# Altium footprint library LimeMicroAltiumLib.PcbLib: 876 footprints (part 38 of 57)
Each footprint in its own frame and in the unit in brackets; x right, y up, seen from the top. Pads: shape width x height; smd on the part's side, far side on the other; paste and mask are expansions set on the pad; w line width, h text height; cw(c..) or ccw(c..) is an arc to the next point about the centre after c.
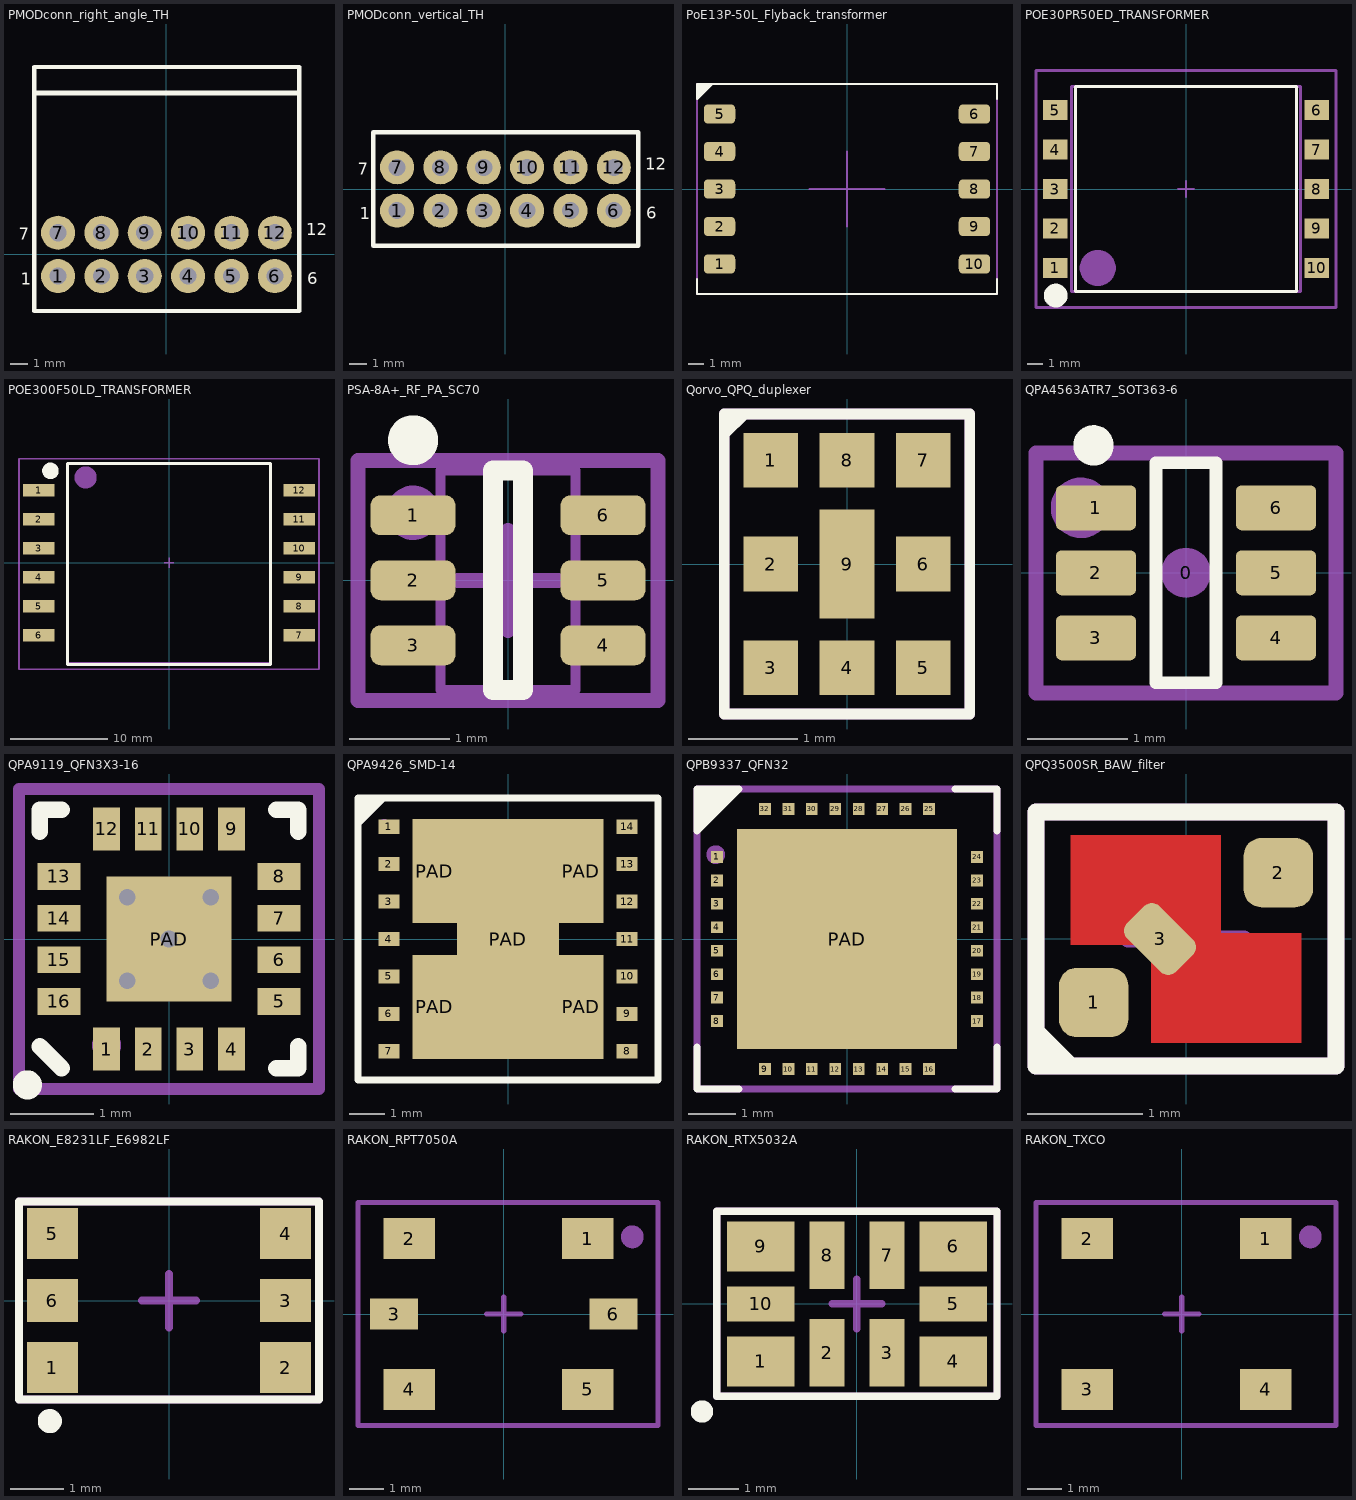
[diagram p37: the footprints below, top view; thin cyan lines are the x and y axes]

## PMODconn_right_angle_TH [mm] "JTAG"
pads (12):
  round 2 hole 1: 1(-6.357,-1.271) 2(-3.814,-1.271) 3(-1.271,-1.271) 4(1.271,-1.271) 5(3.814,-1.271) 6(6.357,-1.271) 7(-6.357,1.271) 8(-3.814,1.271) 9(-1.271,1.271) 10(1.271,1.271) 11(3.814,1.271) 12(6.357,1.271)
Top Overlay:
  lines w0.254: -7.757,-3.321 -7.757,11 7.786,11 7.786,-3.321 -7.757,-3.321
  lines w0.3: -7.7,9.475 7.75,9.475
  text "1" at -8.55,-1.775 h0.7
  text "6" at 8.25,-1.75 h0.7
  text "12" at 8.2,1.125 h0.7
  text "7" at -8.65,0.85 h0.7
Mechanical 15:
  lines w0.15: -7.757,-3.321 7.786,-3.321 7.786,11 -7.757,11 -7.757,-3.321
  text "PCB edge" at -2.225,9.65 h0.55
  text ".Designator" at 0.1,0.025 h0.55
  text "1" at -6.5,-1.75 h0.7
  text "12" at 6.025,0.9 h0.7
3D body "BG151-10-X-0320-X-X_revF.step": height 5, standoff -3.2, extent -5.382,-1.39 7.818,11.45
3D body "BG151-10-X-0320-X-X_revF.step": height 5, standoff -3.2, extent -7.925,-1.39 5.275,11.45

## PMODconn_vertical_TH [mm] "JTAG"
pads (12):
  round 2 hole 1: 1(-6.357,-1.271) 2(-3.814,-1.271) 3(-1.271,-1.271) 4(1.271,-1.271) 5(3.814,-1.271) 6(6.357,-1.271) 7(-6.357,1.271) 8(-3.814,1.271) 9(-1.271,1.271) 10(1.271,1.271) 11(3.814,1.271) 12(6.357,1.271)
Top Overlay:
  lines w0.254: -7.757,-3.321 -7.757,3.321 7.786,3.321 7.786,-3.321 -7.757,-3.321
  text "1" at -8.55,-1.775 h0.7
  text "6" at 8.25,-1.75 h0.7
  text "12" at 8.2,1.125 h0.7
  text "7" at -8.65,0.85 h0.7
Mechanical 15:
  lines w0.15: -7.757,-3.321 7.786,-3.321 7.786,3.321 -7.757,3.321 -7.757,-3.321
  text ".Designator" at 0.1,0.025 h0.55
  text "1" at -6.5,-1.75 h0.7
  text "12" at 6.025,0.9 h0.7

## PoE13P-50L_Flyback_transformer [mm]
pads (10):
  rrect50% 2.1x1.3 smd: 1(-8.5,-5) 2(-8.5,-2.5) 3(-8.5,0) 4(-8.5,2.5) 5(-8.5,5) 6(8.5,5) 7(8.5,2.5) 8(8.5,0) 9(8.5,-2.5) 10(8.5,-5)
Top Overlay:
  region: -10,6 -9,7 -10,7
  lines w0.15: -10,-6 -10,-7 10,-7 10,-6 ; -9,7 -10,6 -10,7 10,7 10,6
Mechanical 15:
  lines w0.15: -2.5,0 2.5,0 ; 0,-2.5 0,2.5 ; -10,-7 10,-7 10,7 -10,7 -10,-7
  text "10" at 8.5,-5.5 h0.55
  text "5" at -9,4.5 h0.55
  text "6" at 8.5,4.5 h0.55
  text "1" at -9,-5.5 h0.55
  text ".Designator" at 0,0 h0.55
3D body "Coilcraft-POE13P-50L.step": height 12.7, standoff 0, extent -8.875,-6.73 8.875,6.73

## POE30PR50ED_TRANSFORMER [mm]
pads (10):
  rect 1.55x1.27 smd: 1(-8.27,-5) 2(-8.27,-2.5) 3(-8.27,0) 4(-8.27,2.5) 5(-8.27,5) 6(8.27,5) 7(8.27,2.5) 8(8.27,0) 9(8.27,-2.5) 10(8.27,-5)
Top Overlay:
  circle w1: c-8.25,-6.75 r0.25
  lines w0.2: -7,-6.5 7,-6.5 7,6.5 -7,6.5 -7,-6.5
Mechanical 13:
  lines w0.2: -7.25,-6.5 7.25,-6.5 7.25,6.5 -7.25,6.5 -7.25,-6.5
Mechanical 15:
  lines w0.15: -0.5,0 0.5,0 ; 0,-0.5 0,0.5
  lines w0.2: -9.5,-7.5 9.5,-7.5 9.5,7.5 -9.5,7.5 -9.5,-7.5
  lines w1.27: -5.588,-5.508 ccw(c-5.588,-5) -5.588,-4.492 ccw(c-5.588,-5) -5.588,-5.508
  text ".Designator" at 0,0 h0.55
3D body "Coilcraft-POEXXPR.step": height 13.93, standoff 0.06, extent -8.5,-7.25 8.5,7.25

## POE300F50LD_TRANSFORMER [mm]
pads (12):
  rect 3.3x1.27 smd: 1(-13.46,7.5) 2(-13.46,4.5) 3(-13.46,1.5) 4(-13.46,-1.5) 5(-13.46,-4.5) 6(-13.46,-7.5) 7(13.46,-7.5) 8(13.46,-4.5) 9(13.46,-1.5) 10(13.46,1.5) 11(13.46,4.5) 12(13.46,7.5)
Top Overlay:
  circle w1: c-12.25,9.5 r0.354
  lines w0.3: -10.5,-10.5 -10.5,10.25 10.5,10.25 10.5,-10.5 -10.5,-10.5
Mechanical 13:
  lines w0.1: -10.5,-10.285 -10.5,10.285 10.5,10.285 10.5,-10.285 -10.5,-10.285
Mechanical 15:
  lines w0.15: -0.5,0 0.5,0 ; 0,-0.5 0,0.5
  lines w0.2: -15.5,-11 -15.5,10.75 15.5,10.75 15.5,-11 -15.5,-11
  lines w1.27: -8.615,8.312 ccw(c-8.615,8.82) -8.615,9.328 ccw(c-8.615,8.82) -8.615,8.312
  text ".Designator" at 0,0 h0.55
3D body "Coilcraft-POE300F-XXX.step": height 11.44, standoff 0.01, extent -14.198,-10.412 14.452,10.158

## PSA-8A+_RF_PA_SC70 [mm] "SOT23, 6-Leads, Body 2x1.3mm, Pitch 0.65mm, Lead Span 2.1mm, IPC Medium Density"
height 1.1
pads (6):
  rrect50% 0.85x0.4 smd mask+0.05: 1(-0.95,0.65) 2(-0.95,0) 3(-0.95,-0.65) 4(0.95,-0.65) 5(0.95,0) 6(0.95,0.65)
Top Overlay:
  circle w0.25: c-0.95,1.4 r0.125
  lines w0.2: -0.15,-1.1 -0.15,1.1 0.15,1.1 0.15,-1.1 -0.15,-1.1
Mechanical 13:
  lines w0.1: -0.675,-1.1 0.675,-1.1 0.675,1.1 -0.675,1.1 -0.675,-1.1
Mechanical 15:
  circle w0.4: c-0.95,0.675 r0.071
  lines w0.15: -0.5,0 0.5,0 ; 0,-0.5 0,0.5 ; -1.5,-1.2 1.5,-1.2 1.5,1.2 -1.5,1.2 -1.5,-1.2
  text ".Designator" at 0,0 h0.55
3D body "User Library-SC70-6.step": height 0.43, standoff -0.53, extent -1.05,-1 1.05,1

## Qorvo_QPQ_duplexer [mm] "QPQ1270, QPQ1282, QPQ1297 BAW duplexers"
pads (9):
  rect 0.5x0.5 smd mask+0.05: 1(-0.7,0.95) 2(-0.7,0) 3(-0.7,-0.95) 4(0,-0.95) 5(0.7,-0.95) 6(0.7,0) 7(0.7,0.95) 8(0,0.95)
  rect 0.5x1 smd mask+0.05: 9(0,0)
Top Overlay:
  region: -1.125,1.375 -1.125,1.125 -0.875,1.375
  lines w0.1: -1.125,-1.375 1.125,-1.375 1.125,1.375 -1.125,1.375 -1.125,-1.375
Mechanical 13:
  region: -0.9,0.75 -0.9,1.15 -0.5,1.15 -0.5,0.75
  region: -0.9,-0.2 -0.9,0.2 -0.5,0.2 -0.5,-0.2
  region: -0.9,-1.15 -0.9,-0.75 -0.5,-0.75 -0.5,-1.15
  region: -0.2,-1.15 -0.2,-0.75 0.2,-0.75 0.2,-1.15
  region: 0.5,-1.15 0.5,-0.75 0.9,-0.75 0.9,-1.15
  region: 0.5,-0.2 0.5,0.2 0.9,0.2 0.9,-0.2
  region: 0.5,0.75 0.5,1.15 0.9,1.15 0.9,0.75
  region: -0.2,0.75 -0.2,1.15 0.2,1.15 0.2,0.75
  region: -0.2,-0.45 -0.2,0.45 0.2,0.45 0.2,-0.45
Mechanical 15:
  circle w0.2: c-0.7,0.975 r0.035
  lines w0.1: -0.175,0 0.175,0 ; 0,-0.175 0,0.175 ; -1.125,-1.375 -1.125,1.375 1.125,1.375 1.125,-1.375 -1.125,-1.375
  text ".Designator" at 0,0 h0.55
3D body: height 1.15, standoff 0, extent -1,-1.25 1,1.25
3D body: height 1.18, standoff 0, extent -0.898,0.751 -0.5,1.15

## QPA4563ATR7_SOT363-6 [mm]
height 1.6
pads (7):
  round 0.5 on Mech15: 0(0,0)
  rrect25% 0.8x0.45 smd: 1(-0.9,0.65) 2(-0.9,0) 3(-0.9,-0.65) 4(0.9,-0.65) 5(0.9,0) 6(0.9,0.65)
Top Overlay:
  circle w0.2: c-0.925,1.275 r0.102
  lines w0.127: -0.3,-1.1 -0.3,1.1 0.3,1.1 0.3,-1.1 -0.3,-1.1
Top Solder:
  region: -1.3,-0.975
  region: -1.4,-0.975 -0.4,-0.975 -0.4,0.975 -1.4,0.975
  region: 1.4,-0.975 0.4,-0.975 0.4,0.975 1.4,0.975
Mechanical 15:
  circle w0.35: c-1.05,0.65 r0.127
  lines w0.15: -1.5,-1.2 -1.5,1.2 1.5,1.2 1.5,-1.2 -1.5,-1.2
  text ".Designator" at 0,0 h0.55
3D body "User Library-SC70-6.step": height 0.92, standoff -0.03, extent -1.05,-1 1.05,1

## QPA9119_QFN3X3-16 [mm] "Quad Flat No Lead, Plastic; 16 Terminals; Body 3 x 3 mm; Pitch 0.5 mm"
height 0.8
pads (17):
  rect 0.32x0.52 smd mask+0.05: 1(-0.75,-1.32) 2(-0.25,-1.32) 3(0.25,-1.32) 4(0.75,-1.32) 9(0.75,1.32) 10(0.25,1.32) 11(-0.25,1.32) 12(-0.75,1.32)
  rect 0.52x0.32 smd mask+0.05: 5(1.32,-0.75) 6(1.32,-0.25) 7(1.32,0.25) 8(1.32,0.75) 13(-1.32,0.75) 14(-1.32,0.25) 15(-1.32,-0.25) 16(-1.32,-0.75)
  rect 1.5x1.5 smd mask+0.05: PAD(0,0)
via -0.5,-0.5 diameter 0.5 hole 0.2
via 0.5,-0.5 diameter 0.5 hole 0.2
via 0.5,0.5 diameter 0.5 hole 0.2
via -0.5,0.5 diameter 0.5 hole 0.2
via 0,0 diameter 0.5 hole 0.2
Top Overlay:
  circle w0.25: c-1.7,-1.75 r0.05
  lines w0.2: -1.55,-1.29 -1.29,-1.55 ; -1.55,1.29 -1.55,1.55 -1.29,1.55 ; 1.29,-1.55 1.55,-1.55 1.55,-1.29 ; 1.29,1.55 1.55,1.55 1.55,1.29
Mechanical 15:
  circle w0.3: c-0.75,-1.275 r0.025
  lines w0.15: -0.475,0 0,0 ; 0,-0.475 0,0 ; 0,0.475 0,0 ; 0.475,0 0,0 ; -1.8,-1.8 1.8,-1.8 1.8,1.8 -1.8,1.8 -1.8,-1.8
  text ".Designator" at 0,0 h0.55
3D body "User Library-QFN16-1.step": height 0.89, standoff 0, extent -1.55,-1.55 1.55,1.55

## QPA9426_SMD-14 [mm]
pads (19):
  rect 0.6x0.4 smd mask+0.05: 1(-3.375,3.18) 2(-3.375,2.12) 3(-3.375,1.06) 4(-3.375,0) 5(-3.375,-1.06) 6(-3.375,-2.12) 7(-3.375,-3.18) 8(3.375,-3.18) 9(3.375,-2.12) 10(3.375,-1.06) 11(3.375,0) 12(3.375,1.06) 13(3.375,2.12) 14(3.375,3.18)
  rect 1.275x2.955 smd mask+0.05: PAD(-2.075,-1.925) PAD(-2.075,1.925) PAD(2.075,-1.925) PAD(2.075,1.925)
  rect 2.9x6.8 smd mask+0.05: PAD(0,0)
Top Overlay:
  region: -3.4,4 -4.25,3.15 -4.25,4
  lines w0.2: -4.25,-4 4.25,-4 4.25,4 -4.25,4 -4.25,-4
Mechanical 15:
  circle w0.2: c-3.5,3.25 r0.05
  lines w0.15: -0.5,0 0.5,0 ; 0,-0.5 0,0.5 ; -4.25,-4 -4.25,4 4.25,4 4.25,-4 -4.25,-4
  text ".Designator" at 0,0 h0.55
3D body: height 1.32, standoff 0, extent -3.5,-3.5 3.5,3.5
3D body: height 1.33, standoff 0, extent -3.298,2.701 -2.7,3.299

## QPB9337_QFN32 [mm]
pads (33):
  rect 0.25x0.25 smd mask+0.05: 1(-2.775,1.75) 2(-2.775,1.25) 3(-2.775,0.75) 4(-2.775,0.25) 5(-2.775,-0.25) 6(-2.775,-0.75) 7(-2.775,-1.25) 8(-2.775,-1.75) 9(-1.75,-2.775) 10(-1.25,-2.775) 11(-0.75,-2.775) 12(-0.25,-2.775) 13(0.25,-2.775) 14(0.75,-2.775) 15(1.25,-2.775) 16(1.75,-2.775) 17(2.775,-1.75) 18(2.775,-1.25) 19(2.775,-0.75) 20(2.775,-0.25) 21(2.775,0.25) 22(2.775,0.75) 23(2.775,1.25) 24(2.775,1.75) 25(1.75,2.775) 26(1.25,2.775) 27(0.75,2.775) 28(0.25,2.775) 29(-0.25,2.775) 30(-0.75,2.775) 31(-1.25,2.775) 32(-1.75,2.775)
  rect 4.7x4.7 smd mask+0.05: PAD(0,0)
Top Overlay:
  region: -3.2,2.3 -3.2,3.2 -2.3,3.2
  lines w0.15: -3.2,-2.3 -3.2,-3.2 -2.3,-3.2 ; 2.3,-3.2 3.2,-3.2 3.2,-2.3 ; 2.3,3.2 3.2,3.2 3.2,2.3 ; -3.2,2.3 -3.2,3.2 -2.3,3.2 -3.2,2.3
Mechanical 15:
  circle w0.2: c-2.8,1.8 r0.1
  lines w0.15: -0.4,0 0,0 ; 0,-0.4 0,0 ; 0,0.4 0,0 ; 0.4,0 0,0 ; -3.2,-3.2 -3.2,3.2 3.2,3.2 3.2,-3.2 -3.2,-3.2
  text ".Designator" at 0,0 h0.55
3D body: height 0.85, standoff 0, extent -3,-3 3,3
3D body: height 0.85, standoff 0, extent -2.699,2.3 -2.301,2.7

## QPQ3500SR_BAW_filter [mm]
pads (3):
  rrect50% 0.6x0.6 smd mask+0.05: 1(-0.8,-0.55) 2(0.8,0.575)
  rrect50% 0.4x0.6 smd rot 45 mask+0.05: 3(-0.225,0)
Top Layer:
  region: -0.3,0.05 -0.3,-0.9 1,-0.9 1,0.05
  region: -1,0.9 -1,-0.05 0.3,-0.05 0.3,0.9
Top Overlay:
  region: -1.3,-0.7 -0.9,-1.1 -1.3,-1.1
  lines w0.15: -1.3,-1.1 1.3,-1.1 1.3,1.1 -1.3,1.1 -1.3,-1.1
Mechanical 15:
  region: -1.3,-1.1
  lines w0.15: -0.5,0 0,0 ; 0,-0.5 0,0 ; 0,0.5 0,0 ; 0.5,0 0,0 ; -1.3,-1.1 -1.3,1.1 1.3,1.1 1.3,-1.1 -1.3,-1.1
  text "2" at 0.8,0.4 h0.4
  text "1" at -0.9,-0.8 h0.4
  text ".Designator" at 0,0 h0.55
3D body "QPQ3500SR.stp": height 0.88, standoff 0, extent -1,-0.8 1,0.8

## RAKON_E8231LF_E6982LF [mm] "RAKON RTX5032A 40MHz Filter enabled, with VC, 10pin 5mm x 3.2mm"
height 1.65
pads (6):
  rect 0.95x0.95 smd mask+0.05: 1(-2.175,-1.25) 2(2.175,-1.25) 4(2.175,1.25) 5(-2.175,1.25)
  rect 0.95x0.8 smd mask+0.05: 3(2.175,0) 6(-2.175,0)
Top Overlay:
  circle w0.25: c-2.225,-2.25 r0.1
  lines w0.15: -2.8,-1.85 -2.8,1.85 2.8,1.85 2.8,-1.85 -2.8,-1.85
Mechanical 15:
  circle w0.25: c-2.175,-1.15 r0.1
  lines w0.15: -0.5,0 0,0 ; 0,-0.5 0,0 ; 0,0.5 0,0 ; 0.5,0 0,0 ; -2.8,-1.85 -2.8,1.85 2.8,1.85 2.8,-1.85 -2.8,-1.85
  text ".Designator" at 0,0 h0.55
3D body "User Library-Crystal.step": height 0.9, standoff -0.05, extent -2.5,-1.6 2.5,1.6

## RAKON_RPT7050A [mm] "Rakon's Pluto+ ASIC"
pads (6):
  rect 1.5x1.2 smd: 1(2.45,2.2) 2(-2.75,2.2) 4(-2.75,-2.2) 5(2.45,-2.2)
  rect 1.4x0.9 smd: 3(-3.2,0) 6(3.2,0)
Mechanical 15:
  circle w0.35: c3.75,2.25 r0.158
  lines w0.15: -0.5,0 0.5,0 ; 0,-0.5 0,0.5 ; -4.25,-3.25 4.5,-3.25 4.5,3.25 -4.25,3.25 -4.25,-3.25
  text ".Designator" at 0,0 h0.55
3D body: height 0.1, standoff 0, extent 4.15,1.8 4.25,1.9
3D body "CAP 0402 (1005 metric).STEP": height 1.55, standoff 1, extent -0.825,-1.975 0.225,-1.425
3D body "CAP 0402 (1005 metric).STEP": height 1.55, standoff 1, extent 0.975,-1.975 2.025,-1.425
3D body "CAP 0402 (1005 metric).STEP": height 1.55, standoff 1, extent 2.125,0.775 2.675,1.825
3D body "CAP 0402 (1005 metric).STEP": height 1.55, standoff 1, extent 2.125,-1.025 2.675,0.025
3D body "Crystal TXC Corp 7M series.STEP": height 1.8, standoff 1, extent -2.95,-0.6 0.35,2
3D body "RES 0402 (1005 metric).STEP": height 1.4, standoff 1, extent -2.525,-1.975 -1.475,-1.425
3D body: height 1, standoff 0, extent -3.5,-2.3 3.2,2.3

## RAKON_RTX5032A [mm] "RAKON RTX5032A 40MHz Filter enabled, with VC, 10pin 5mm x 3.2mm"
height 1.65
pads (10):
  rect 1.35x1 smd mask+0.05: 1(-1.925,-1.15) 4(1.925,-1.15) 6(1.925,1.15) 9(-1.925,1.15)
  rect 0.7x1.35 smd mask+0.05: 2(-0.6,-0.975) 3(0.6,-0.975) 7(0.6,0.975) 8(-0.6,0.975)
  rect 1.35x0.7 smd mask+0.05: 5(1.925,0) 10(-1.925,0)
Top Overlay:
  circle w0.25: c-3.1,-2.15 r0.1
  lines w0.15: -2.8,-1.85 -2.8,1.85 2.8,1.85 2.8,-1.85 -2.8,-1.85
Mechanical 15:
  circle w0.25: c-1.9,-1.1 r0.1
  lines w0.15: -0.5,0 0,0 ; 0,-0.5 0,0 ; 0,0.5 0,0 ; 0.5,0 0,0 ; -2.8,-1.85 -2.8,1.85 2.8,1.85 2.8,-1.85 -2.8,-1.85
  text ".Designator" at 0,0 h0.55
3D body "User Library-Crystal.step": height 0.9, standoff -0.05, extent -2.5,-1.6 2.5,1.6

## RAKON_TXCO [mm] "30.72 MHz or 61.44 MHz"
pads (4):
  rect 1.5x1.2 smd: 1(2.45,2.2) 2(-2.75,2.2) 3(-2.75,-2.2) 4(2.45,-2.2)
Mechanical 15:
  circle w0.35: c3.75,2.25 r0.158
  lines w0.15: -0.5,0 0.5,0 ; 0,-0.5 0,0.5 ; -4.25,-3.25 4.5,-3.25 4.5,3.25 -4.25,3.25 -4.25,-3.25
  text ".Designator" at 0,0 h0.55
3D body "CAP 0402 (1005 metric).STEP": height 1.55, standoff 1, extent -0.825,-1.975 0.225,-1.425
3D body "CAP 0402 (1005 metric).STEP": height 1.55, standoff 1, extent 0.975,-1.975 2.025,-1.425
3D body "CAP 0402 (1005 metric).STEP": height 1.55, standoff 1, extent 2.125,0.775 2.675,1.825
3D body "CAP 0402 (1005 metric).STEP": height 1.55, standoff 1, extent 2.125,-1.025 2.675,0.025
3D body "Crystal TXC Corp 7M series.STEP": height 1.8, standoff 1, extent -2.95,-0.6 0.35,2
3D body "RES 0402 (1005 metric).STEP": height 1.4, standoff 1, extent -2.525,-1.975 -1.475,-1.425
3D body: height 1, standoff 0, extent -3.5,-2.3 3.2,2.3